# EAGLE library part MT3608 (library rtd2660_board)
MT3608 2 A boost converter, SOT-23-6, VFB = 0.6 V
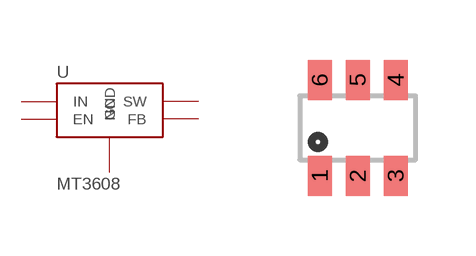
[diagram p9: symbol with the pads of SOT23-6; footprint SOT23-6]

Designator prefix U

## MT3608  [SOT23-6]
1  SW  pas
2  GND  pas
3  FB  pas
4  EN  pas
5  IN  pas
6  NC  pas

## Footprint SOT23-6 (pad centres in mm)
SOT-23-6
smd 0.6 x 1: 1 -0.95,-1.2; 2 0,-1.2; 3 0.95,-1.2; 4 0.95,1.2; 5 0,1.2; 6 -0.95,1.2